# Altium schematic symbol library LM317T.SchLib: 1 symbol
Pins are listed as number, name and electrical type; pins without a type are passive.

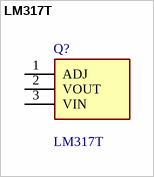
[diagram p0: symbol LM317T]

## LM317T
designator Q?
Linear Voltage Regulator IC Positive Adjustable 1 Output 1.5A TO-220; Manufacturer_Name: Analog Devices; Geometry.Height: 4.699mm; Manufacturer_Part_Number: LM317T; Mouser Part Number: *; Mouser Price/Stock: *; Arrow Part Number: *; Arrow Price/Stock: *; Datasheet Link: https://datasheet.pas.partquest.com/images/VipMasterIC/IC/LITC/LITCS04748/LITCS04748-1.pdf?hkey=61A2E4C270F0397D049F8F05BD4F1054
footprint TO254P470X1036X1920-3P
pins: 1 ADJ, 2 VOUT, 3 VIN